# Altium schematic symbol library HC-05.SchLib: 1 symbol
Pins are listed as number, name and electrical type; pins without a type are passive.

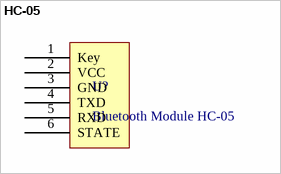
[diagram p0: symbol HC-05]

## HC-05
designator U?, comment Bluetooth Module HC-05
footprint HC-05 (Bluetooth Module HC-05)
pins: 1 Key, 2 VCC "Normally connected to 5V", 3 GND, 4 TXD, 5 RXD, 6 STATE